# Altium footprint library FootPrintLib_3.PcbLib: 198 footprints (part 8 of 13)
Each footprint in its own frame and in the unit in brackets; x right, y up, seen from the top. Pads: shape width x height; smd on the part's side, far side on the other; paste and mask are expansions set on the pad; w line width, h text height; cw(c..) or ccw(c..) is an arc to the next point about the centre after c.
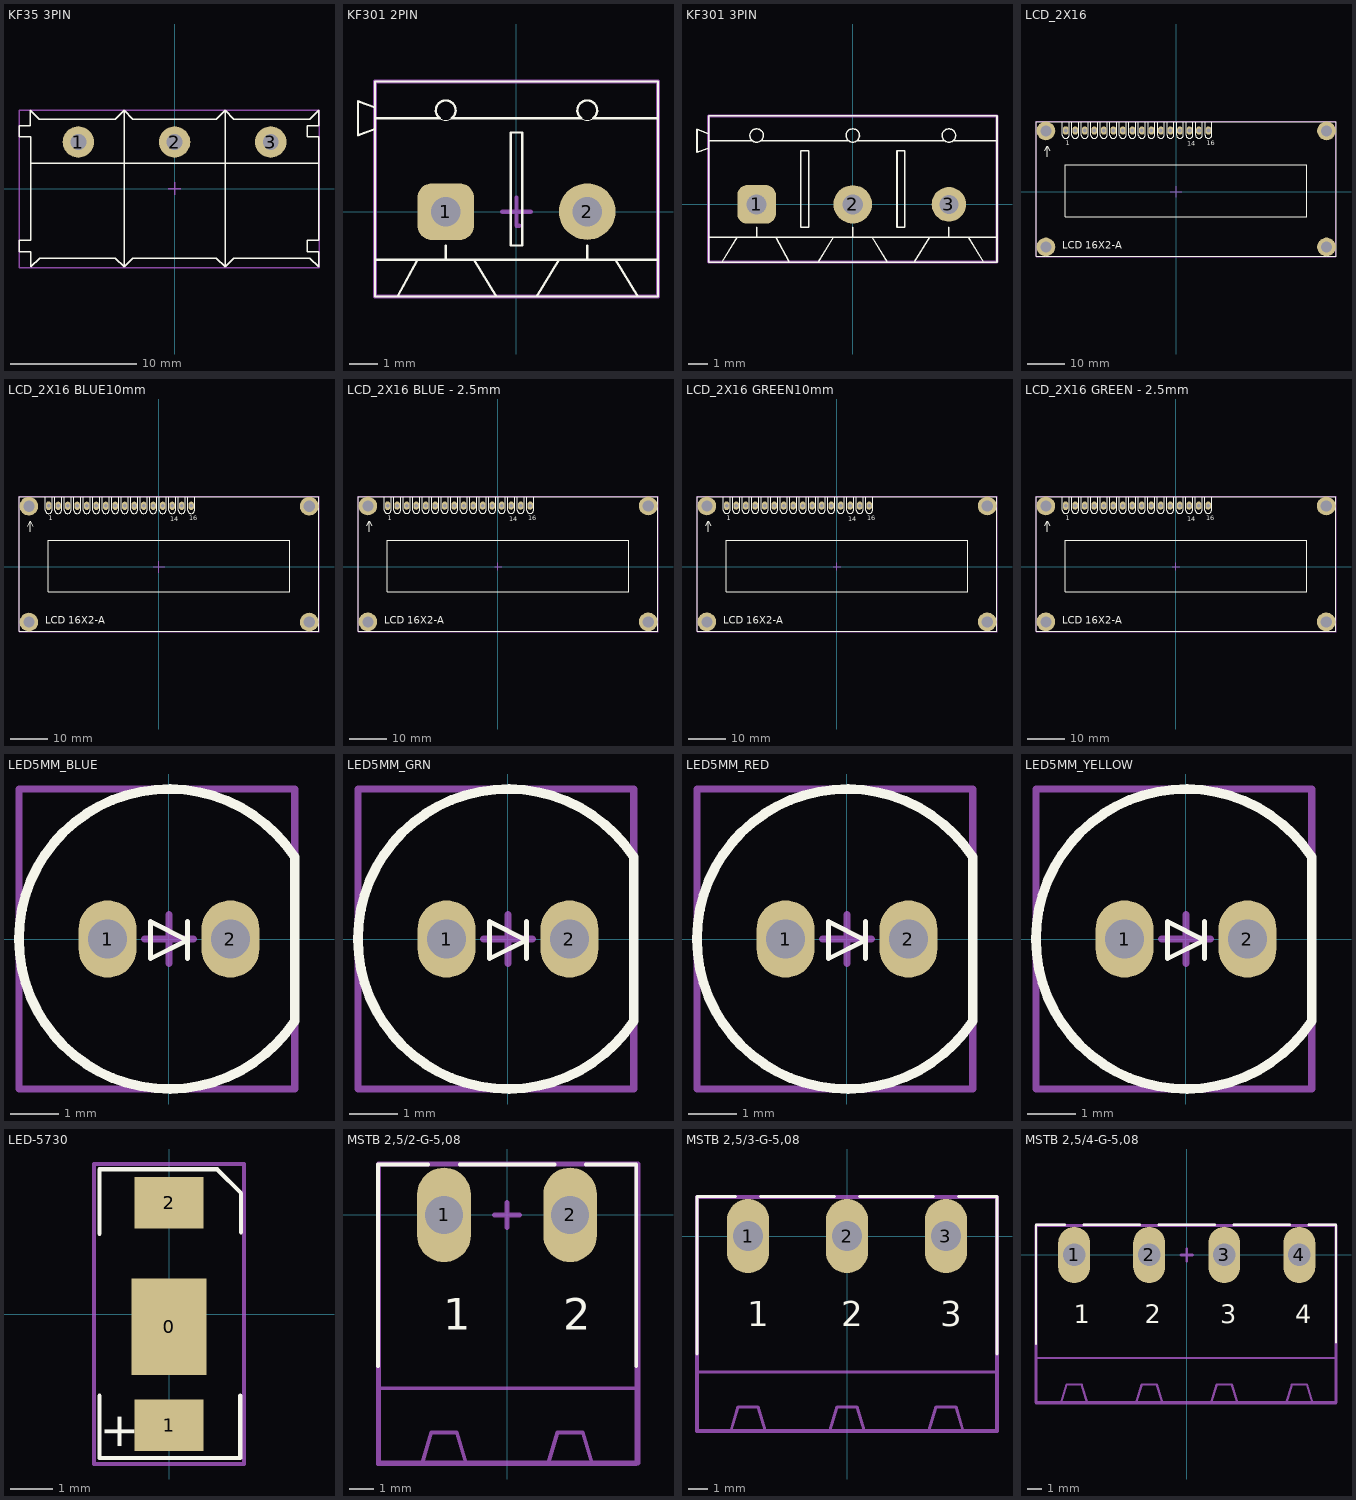
[diagram p7: the footprints below, top view; thin cyan lines are the x and y axes]

## KF35 3PIN [mm] "Designer Abbas Basereh"
height 12.5
pads (3):
  round 2.5 hole 1.25: 1(-7.62,3.7) 2(0,3.7) 3(7.62,3.7)
Top Overlay:
  lines w0.1: -11.4,2 11.4,2 ; -4,-6.2 -4,6.2 ; -4,-6.2 -3.3,-5.5 3.3,-5.5 4,-6.2 ; -4,-6.2 -4.7,-5.5 -10.7,-5.5 -11.4,-6.2 -11.4,-5 -12.3,-5 -12.3,-4.1 -11.4,-4.1 -11.4,4.1 -11.43,4.1 -12.33,4.1 -12.33,5 -11.43,5 -11.43,6.2 -10.73,5.5 -4.7,5.5 -4,6.2 ; -4,6.2 -3.3,5.5 3.3,5.5 4,6.2 ; 4,-6.2 4,6.2 ; 4,-6.2 4.7,-5.5 10.73,-5.5 11.43,-6.2 11.43,-5 10.53,-5 10.53,-4.1 11.43,-4.1 11.43,4.1 10.53,4.1 10.53,5 11.43,5 11.43,6.2 10.73,5.5 4.7,5.5 4,6.2
Mechanical 15:
  lines w0.1: -0.5,0 0.5,0 ; 0,-0.5 0,0.5 ; -12.3,-6.275 -12.3,6.225 11.45,6.225 11.45,-6.275 -12.3,-6.275

## KF301 2PIN [mm] "Designer Abbas Basereh"
height 7.5
pads (2):
  rrect50% 2x2 hole 1.05: 1(-2.5,0)
  round 2 hole 1.05: 2(2.5,0)
Top Overlay:
  lines w0.013: -2.71,3.3 ccw(c-2.5,3.58) -2.29,3.3 ; 2.29,3.3 ccw(c2.5,3.58) 2.71,3.3
  lines w0.08: -4.2,-3 -3.5,-1.7 -1.5,-1.7 -0.7,-3 ; -2.5,-1.7 -2.5,-1.2 ; 0.7,-3 1.5,-1.7 3.5,-1.7 4.3,-3 ; 2.5,-1.7 2.5,-1.2 ; -5.6,2.7 -5,2.918 ; -5.6,2.7 -5.6,3.9 ; -5.6,2.7 -5,2.918 ; -5.6,2.7 -5.6,3.9 ; -5.6,3.9 -5,3.682 ; -5.6,3.9 -5,3.682 ; -5,-3 -5,-1.7 ; -5,-3 5,-3 ; -5,-3 5,-3 ; -5,-3 -5,2.918 ; -5,-1.7 -5,3.3 ; -5,-1.7 5,-1.7 ; -5,3.3 -5,4.6 ; -5,3.3 -2.71,3.3 cw(c-2.5,3.58) -2.29,3.3 2.29,3.3 cw(c2.5,3.58) 2.71,3.3 5,3.3 ; -5,3.682 -5,4.6 ; -5,4.6 5,4.6 ; -5,4.6 5,4.6 ; 5,-3 5,-1.7 ; 5,-3 5,4.6 ; 5,-1.7 5,3.3 ; 5,3.3 5,4.6 ; -0.2,-1.2 -0.2,2.8 0.2,2.8 0.2,-1.2 -0.2,-1.2
Mechanical 15:
  lines w0.15: -0.5,0 0.5,0 ; 0,0.5 0,-0.5 0.1,-0.5 ; -5,-3 5,-3 5,4.6 -5,4.6 -5,-3
3D body "User Library-Terminal-Screw-3A-2way.STEP": height 10, standoff -3, extent -5.6,-3 5,4.6

## KF301 3PIN [mm] "Designer Abbas Basereh"
height 7.5
pads (3):
  rrect50% 2x2 hole 1.05: 1(-5,0)
  round 2 hole 1.05: 2(0,0)
  round 1.8 hole 1: 3(5,0)
Top Overlay:
  lines w0.08: -6.8,-3 -6,-1.7 -4,-1.7 -3.3,-3 ; -5,-1.7 -5,-1.2 ; -1.8,-3 -1,-1.7 1,-1.7 1.8,-3 ; 0,-1.7 0,-1.2 ; 3.2,-3 4,-1.7 6,-1.7 6.8,-3 ; 5,-1.7 5,-1.2 ; -8.1,2.7 -7.5,2.918 ; -8.1,2.7 -8.1,3.9 ; -8.1,2.7 -8.1,3.9 ; -8.1,2.7 -7.5,2.918 ; -8.1,3.9 -7.5,3.681 ; -8.1,3.9 -7.5,3.681 ; -7.5,-3 7.5,-3 ; -7.5,-3 -7.5,2.918 ; -7.5,-3 7.5,-3 ; -7.5,-3 -7.5,-1.7 ; -7.5,-1.7 7.5,-1.7 ; -7.5,-1.7 -7.5,3.3 ; -7.5,3.3 -5.21,3.3 ; -7.5,3.3 -7.5,4.6 ; -7.5,3.681 -7.5,4.6 ; -7.5,4.6 7.5,4.6 ; -7.5,4.6 7.5,4.6 ; -5.21,3.3 cw(c-5,3.58) -4.79,3.3 ; -5.21,3.3 ccw(c-5,3.58) -4.79,3.3 ; -4.79,3.3 -0.21,3.3 ; -0.21,3.3 cw(c0,3.58) 0.21,3.3 ; -0.21,3.3 ccw(c0,3.58) 0.21,3.3 ; 0.21,3.3 4.79,3.3 ; 4.79,3.3 cw(c5,3.58) 5.21,3.3 ; 4.79,3.3 ccw(c5,3.58) 5.21,3.3 ; 5.21,3.3 7.5,3.3 ; 7.5,-3 7.5,4.6 ; 7.5,-3 7.5,-1.7 ; 7.5,-1.7 7.5,3.3 ; 7.5,3.3 7.5,4.6 ; -2.7,-1.2 -2.7,2.8 -2.3,2.8 -2.3,-1.2 -2.7,-1.2 ; 2.3,-1.2 2.7,-1.2 2.7,2.8 2.3,2.8 2.3,-1.2
Mechanical 15:
  lines w0.15: -7.5,-3 -7.5,4.6 7.5,4.6 7.5,-3 -7.5,-3
3D body "User Library-Terminal-Screw-3A-3way.STEP": height 10, standoff -3, extent -8.1,-3 7.5,4.6

## LCD_2X16 [mm] "LCD 2x16 Alphanumberic-Designer Abbas Basereh"
height 50
pads (20):
  oct 1.5x2.2 hole 1: 1(-29.464,16.3)
  oval 1.5x2.2 hole 1: 2(-26.924,16.3) 3(-24.384,16.3) 4(-21.844,16.3) 5(-19.304,16.3) 6(-16.764,16.3) 7(-14.224,16.3) 8(-11.684,16.3) 9(-9.144,16.3) 10(-6.604,16.3) 11(-4.064,16.3) 12(-1.524,16.3) 13(1.016,16.3) 14(3.556,16.3) 15(6.096,16.3) 16(8.636,16.3)
  round 5 hole 3: ""(-34.756,-14.775) ""(-34.756,16.213) ""(40.174,-14.775) ""(40.174,16.213)
Top Overlay:
  circle w0.2: c-34.796,-14.788 r1.25
  circle w0.2: c40.204,-14.788 r1.25
  circle w0.2: c-34.796,16.213 r1.25
  circle w0.2: c40.204,16.213 r1.25
  lines w0.2: -35.01,10.879 -34.375,12.149 -33.74,10.879 ; -34.375,9.337 -34.375,12.022 ; -30.353,18.669 -30.353,15.113 ccw(c-29.464,15.113) -28.575,15.113 -28.575,18.669 ; -27.813,18.669 -27.813,15.113 ccw(c-26.924,15.113) -26.035,15.113 -26.035,18.669 ; -25.273,18.669 -25.273,15.113 ccw(c-24.384,15.113) -23.495,15.113 -23.495,18.669 ; -22.733,18.669 -22.733,15.113 ccw(c-21.844,15.113) -20.955,15.113 -20.955,18.669 ; -20.193,18.669 -20.193,15.113 ccw(c-19.304,15.113) -18.415,15.113 -18.415,18.669 ; -17.653,18.669 -17.653,15.113 ccw(c-16.764,15.113) -15.875,15.113 -15.875,18.669 ; -15.113,18.669 -15.113,15.113 ccw(c-14.224,15.113) -13.335,15.113 -13.335,18.669 ; -12.573,18.669 -12.573,15.113 ccw(c-11.684,15.113) -10.795,15.113 -10.795,18.669 ; -10.033,18.669 -10.033,15.113 ccw(c-9.144,15.113) -8.255,15.113 -8.255,18.669 ; -7.493,18.669 -7.493,15.113 ccw(c-6.604,15.113) -5.715,15.113 -5.715,18.669 ; -4.953,18.669 -4.953,15.113 ccw(c-4.064,15.113) -3.175,15.113 -3.175,18.669 ; -2.413,18.669 -2.413,15.113 ccw(c-1.524,15.113) -0.635,15.113 -0.635,18.669 ; 0.127,18.669 0.127,15.113 ccw(c1.016,15.113) 1.905,15.113 1.905,18.669 ; 2.667,18.669 2.667,15.113 ccw(c3.556,15.113) 4.445,15.113 4.445,18.669 ; 5.207,18.669 5.207,15.113 ccw(c6.096,15.113) 6.985,15.113 6.985,18.669 ; 7.747,18.669 7.747,15.113 ccw(c8.636,15.113) 9.525,15.113 9.525,18.669 ; -37.296,-17.288 42.704,-17.288 42.704,18.712 -37.296,18.712 -37.296,-17.288 ; -29.546,-6.688 -29.546,7.112 34.954,7.112 34.954,-6.688 -29.546,-6.688
  text "14" at 3.048,12.192 h1.27
  text "1" at -29.464,12.446 h1.27
  text "16" at 8.128,12.446 h1.27
  text "LCD 16X2-A" at -30.438,-15.283 h1.91
Mechanical 15:
  lines w0.15: -1.5,0 1.5,0 ; 0,-1.5 0,1.5 ; -37.4,-17.4 42.7,-17.4 42.7,18.8 -37.4,18.8 -37.4,-17.4
3D body "User Library-AC162B.STEP": height 21, standoff 7.1, extent -37.35,-17.3 42.65,18.7
3D body: height 10, standoff 0, extent -37.338,13.589 -32.131,18.796
3D body: height 10, standoff 0, extent -37.338,-17.399 -32.131,-12.192
3D body: height 10, standoff 0, extent 37.592,-17.399 42.799,-12.192
3D body: height 10, standoff 0, extent 37.592,13.589 42.799,18.796

## LCD_2X16 BLUE10mm [mm] "LCD 2x16 Alphanumberic-Designer Abbas Basereh"
height 50
pads (20):
  oct 1.5x2.2 hole 1: 1(-29.464,16.3)
  oval 1.5x2.2 hole 1: 2(-26.924,16.3) 3(-24.384,16.3) 4(-21.844,16.3) 5(-19.304,16.3) 6(-16.764,16.3) 7(-14.224,16.3) 8(-11.684,16.3) 9(-9.144,16.3) 10(-6.604,16.3) 11(-4.064,16.3) 12(-1.524,16.3) 13(1.016,16.3) 14(3.556,16.3) 15(6.096,16.3) 16(8.636,16.3)
  round 5 hole 3: ""(-34.756,-14.775) ""(-34.756,16.213) ""(40.174,-14.775) ""(40.174,16.213)
Top Overlay:
  circle w0.2: c40.204,16.213 r1.25
  circle w0.2: c-34.796,16.213 r1.25
  circle w0.2: c40.204,-14.788 r1.25
  circle w0.2: c-34.796,-14.788 r1.25
  lines w0.2: -35.01,10.879 -34.375,12.149 -33.74,10.879 ; -34.375,9.337 -34.375,12.022 ; -30.353,18.669 -30.353,15.113 ccw(c-29.464,15.113) -28.575,15.113 -28.575,18.669 ; -27.813,18.669 -27.813,15.113 ccw(c-26.924,15.113) -26.035,15.113 -26.035,18.669 ; -25.273,18.669 -25.273,15.113 ccw(c-24.384,15.113) -23.495,15.113 -23.495,18.669 ; -22.733,18.669 -22.733,15.113 ccw(c-21.844,15.113) -20.955,15.113 -20.955,18.669 ; -20.193,18.669 -20.193,15.113 ccw(c-19.304,15.113) -18.415,15.113 -18.415,18.669 ; -17.653,18.669 -17.653,15.113 ccw(c-16.764,15.113) -15.875,15.113 -15.875,18.669 ; -15.113,18.669 -15.113,15.113 ccw(c-14.224,15.113) -13.335,15.113 -13.335,18.669 ; -12.573,18.669 -12.573,15.113 ccw(c-11.684,15.113) -10.795,15.113 -10.795,18.669 ; -10.033,18.669 -10.033,15.113 ccw(c-9.144,15.113) -8.255,15.113 -8.255,18.669 ; -7.493,18.669 -7.493,15.113 ccw(c-6.604,15.113) -5.715,15.113 -5.715,18.669 ; -4.953,18.669 -4.953,15.113 ccw(c-4.064,15.113) -3.175,15.113 -3.175,18.669 ; -2.413,18.669 -2.413,15.113 ccw(c-1.524,15.113) -0.635,15.113 -0.635,18.669 ; 0.127,18.669 0.127,15.113 ccw(c1.016,15.113) 1.905,15.113 1.905,18.669 ; 2.667,18.669 2.667,15.113 ccw(c3.556,15.113) 4.445,15.113 4.445,18.669 ; 5.207,18.669 5.207,15.113 ccw(c6.096,15.113) 6.985,15.113 6.985,18.669 ; 7.747,18.669 7.747,15.113 ccw(c8.636,15.113) 9.525,15.113 9.525,18.669 ; -37.296,-17.288 -37.296,18.712 42.704,18.712 42.704,-17.288 -37.296,-17.288 ; -29.546,-6.688 34.954,-6.688 34.954,7.112 -29.546,7.112 -29.546,-6.688
  text "LCD 16X2-A" at -30.438,-15.283 h1.91
  text "16" at 8.128,12.446 h1.27
  text "1" at -29.464,12.446 h1.27
  text "14" at 3.048,12.192 h1.27
Mechanical 15:
  lines w0.15: -1.5,0 1.5,0 ; -0.1,-1.6 -0.1,1.5 ; -37.4,-17.4 42.8,-17.4 42.8,18.9 -37.4,18.9 -37.4,-17.4
3D body: height 10, standoff 0, extent 37.592,13.589 42.799,18.796
3D body: height 10, standoff 0, extent 37.592,-17.399 42.799,-12.192
3D body: height 10, standoff 0, extent -37.338,-17.399 -32.131,-12.192
3D body: height 10, standoff 0, extent -37.338,13.589 -32.131,18.796
3D body "User Library-LCD-5.STEP": height 19.8, standoff 1.5, extent -37.35,-17.3 42.65,18.7
3D body: height 10, standoff 0, extent -30.25,15.25 9.75,17.75

## LCD_2X16 BLUE - 2.5mm [mm] "LCD 2x16 Alphanumberic-Designer Abbas Basereh"
height 40
pads (20):
  oct 1.5x2.2 hole 1: 1(-29.464,16.3)
  oval 1.5x2.2 hole 1: 2(-26.924,16.3) 3(-24.384,16.3) 4(-21.844,16.3) 5(-19.304,16.3) 6(-16.764,16.3) 7(-14.224,16.3) 8(-11.684,16.3) 9(-9.144,16.3) 10(-6.604,16.3) 11(-4.064,16.3) 12(-1.524,16.3) 13(1.016,16.3) 14(3.556,16.3) 15(6.096,16.3) 16(8.636,16.3)
  round 5 hole 3: ""(-34.756,-14.775) ""(-34.756,16.213) ""(40.174,-14.775) ""(40.174,16.213)
Top Overlay:
  circle w0.2: c40.204,16.213 r1.25
  circle w0.2: c-34.796,16.213 r1.25
  circle w0.2: c40.204,-14.788 r1.25
  circle w0.2: c-34.796,-14.788 r1.25
  lines w0.2: -35.01,10.879 -34.375,12.149 -33.74,10.879 ; -34.375,9.337 -34.375,12.022 ; -30.353,18.669 -30.353,15.113 ccw(c-29.464,15.113) -28.575,15.113 -28.575,18.669 ; -27.813,18.669 -27.813,15.113 ccw(c-26.924,15.113) -26.035,15.113 -26.035,18.669 ; -25.273,18.669 -25.273,15.113 ccw(c-24.384,15.113) -23.495,15.113 -23.495,18.669 ; -22.733,18.669 -22.733,15.113 ccw(c-21.844,15.113) -20.955,15.113 -20.955,18.669 ; -20.193,18.669 -20.193,15.113 ccw(c-19.304,15.113) -18.415,15.113 -18.415,18.669 ; -17.653,18.669 -17.653,15.113 ccw(c-16.764,15.113) -15.875,15.113 -15.875,18.669 ; -15.113,18.669 -15.113,15.113 ccw(c-14.224,15.113) -13.335,15.113 -13.335,18.669 ; -12.573,18.669 -12.573,15.113 ccw(c-11.684,15.113) -10.795,15.113 -10.795,18.669 ; -10.033,18.669 -10.033,15.113 ccw(c-9.144,15.113) -8.255,15.113 -8.255,18.669 ; -7.493,18.669 -7.493,15.113 ccw(c-6.604,15.113) -5.715,15.113 -5.715,18.669 ; -4.953,18.669 -4.953,15.113 ccw(c-4.064,15.113) -3.175,15.113 -3.175,18.669 ; -2.413,18.669 -2.413,15.113 ccw(c-1.524,15.113) -0.635,15.113 -0.635,18.669 ; 0.127,18.669 0.127,15.113 ccw(c1.016,15.113) 1.905,15.113 1.905,18.669 ; 2.667,18.669 2.667,15.113 ccw(c3.556,15.113) 4.445,15.113 4.445,18.669 ; 5.207,18.669 5.207,15.113 ccw(c6.096,15.113) 6.985,15.113 6.985,18.669 ; 7.747,18.669 7.747,15.113 ccw(c8.636,15.113) 9.525,15.113 9.525,18.669 ; -37.296,-17.288 -37.296,18.712 42.704,18.712 42.704,-17.288 -37.296,-17.288 ; -29.546,-6.688 34.954,-6.688 34.954,7.112 -29.546,7.112 -29.546,-6.688
  text "LCD 16X2-A" at -30.438,-15.283 h1.91
  text "16" at 8.128,12.446 h1.27
  text "1" at -29.464,12.446 h1.27
  text "14" at 3.048,12.192 h1.27
Mechanical 15:
  lines w0.15: -0.9,0 1,0 ; 0,-1 0,1 ; -37.4,-17.4 -37.4,18.8 42.8,18.8 42.8,-17.4 -37.4,-17.4
3D body "User Library-LCD-5.STEP": height 12.3, standoff -6, extent -37.35,-17.3 42.65,18.7

## LCD_2X16 GREEN10mm [mm] "LCD 2x16 Alphanumberic-Designer Abbas Basereh"
height 50
pads (20):
  oct 1.5x2.2 hole 1: 1(-29.464,16.3)
  oval 1.5x2.2 hole 1: 2(-26.924,16.3) 3(-24.384,16.3) 4(-21.844,16.3) 5(-19.304,16.3) 6(-16.764,16.3) 7(-14.224,16.3) 8(-11.684,16.3) 9(-9.144,16.3) 10(-6.604,16.3) 11(-4.064,16.3) 12(-1.524,16.3) 13(1.016,16.3) 14(3.556,16.3) 15(6.096,16.3) 16(8.636,16.3)
  round 5 hole 3: ""(-34.756,-14.775) ""(-34.756,16.213) ""(40.174,-14.775) ""(40.174,16.213)
Top Overlay:
  circle w0.2: c-34.796,-14.788 r1.25
  circle w0.2: c40.204,-14.788 r1.25
  circle w0.2: c-34.796,16.213 r1.25
  circle w0.2: c40.204,16.213 r1.25
  lines w0.2: -35.01,10.879 -34.375,12.149 -33.74,10.879 ; -34.375,9.337 -34.375,12.022 ; -30.353,18.669 -30.353,15.113 ccw(c-29.464,15.113) -28.575,15.113 -28.575,18.669 ; -27.813,18.669 -27.813,15.113 ccw(c-26.924,15.113) -26.035,15.113 -26.035,18.669 ; -25.273,18.669 -25.273,15.113 ccw(c-24.384,15.113) -23.495,15.113 -23.495,18.669 ; -22.733,18.669 -22.733,15.113 ccw(c-21.844,15.113) -20.955,15.113 -20.955,18.669 ; -20.193,18.669 -20.193,15.113 ccw(c-19.304,15.113) -18.415,15.113 -18.415,18.669 ; -17.653,18.669 -17.653,15.113 ccw(c-16.764,15.113) -15.875,15.113 -15.875,18.669 ; -15.113,18.669 -15.113,15.113 ccw(c-14.224,15.113) -13.335,15.113 -13.335,18.669 ; -12.573,18.669 -12.573,15.113 ccw(c-11.684,15.113) -10.795,15.113 -10.795,18.669 ; -10.033,18.669 -10.033,15.113 ccw(c-9.144,15.113) -8.255,15.113 -8.255,18.669 ; -7.493,18.669 -7.493,15.113 ccw(c-6.604,15.113) -5.715,15.113 -5.715,18.669 ; -4.953,18.669 -4.953,15.113 ccw(c-4.064,15.113) -3.175,15.113 -3.175,18.669 ; -2.413,18.669 -2.413,15.113 ccw(c-1.524,15.113) -0.635,15.113 -0.635,18.669 ; 0.127,18.669 0.127,15.113 ccw(c1.016,15.113) 1.905,15.113 1.905,18.669 ; 2.667,18.669 2.667,15.113 ccw(c3.556,15.113) 4.445,15.113 4.445,18.669 ; 5.207,18.669 5.207,15.113 ccw(c6.096,15.113) 6.985,15.113 6.985,18.669 ; 7.747,18.669 7.747,15.113 ccw(c8.636,15.113) 9.525,15.113 9.525,18.669 ; -37.296,-17.288 42.704,-17.288 42.704,18.712 -37.296,18.712 -37.296,-17.288 ; -29.546,-6.688 -29.546,7.112 34.954,7.112 34.954,-6.688 -29.546,-6.688
  text "14" at 3.048,12.192 h1.27
  text "1" at -29.464,12.446 h1.27
  text "16" at 8.128,12.446 h1.27
  text "LCD 16X2-A" at -30.438,-15.283 h1.91
Mechanical 15:
  lines w0.15: -1,0 1,0 ; 0,-1 0,1 ; -37.4,-17.4 -37.4,18.8 42.8,18.8 42.8,-17.4 -37.3,-17.4 -37.4,-17.4
3D body: height 10, standoff 0, extent -30.25,15.25 9.75,17.75
3D body "User Library-LCD 16x2 JHD162A.STEP": height 20.6, standoff 7.45, extent -37.35,-17.3 42.65,18.7
3D body: height 10, standoff 0, extent -37.338,13.589 -32.131,18.796
3D body: height 10, standoff 0, extent -37.338,-17.399 -32.131,-12.192
3D body: height 10, standoff 0, extent 37.592,-17.399 42.799,-12.192
3D body: height 10, standoff 0, extent 37.592,13.589 42.799,18.796

## LCD_2X16 GREEN - 2.5mm [mm] "LCD 2x16 Alphanumberic-Designer Abbas Basereh"
height 40
pads (20):
  oct 1.5x2.2 hole 1: 1(-29.464,16.3)
  oval 1.5x2.2 hole 1: 2(-26.924,16.3) 3(-24.384,16.3) 4(-21.844,16.3) 5(-19.304,16.3) 6(-16.764,16.3) 7(-14.224,16.3) 8(-11.684,16.3) 9(-9.144,16.3) 10(-6.604,16.3) 11(-4.064,16.3) 12(-1.524,16.3) 13(1.016,16.3) 14(3.556,16.3) 15(6.096,16.3) 16(8.636,16.3)
  round 5 hole 3: ""(-34.756,-14.775) ""(-34.756,16.213) ""(40.174,-14.775) ""(40.174,16.213)
Top Overlay:
  circle w0.2: c-34.796,-14.788 r1.25
  circle w0.2: c40.204,-14.788 r1.25
  circle w0.2: c-34.796,16.213 r1.25
  circle w0.2: c40.204,16.213 r1.25
  lines w0.2: -35.01,10.879 -34.375,12.149 -33.74,10.879 ; -34.375,9.337 -34.375,12.022 ; -30.353,18.669 -30.353,15.113 ccw(c-29.464,15.113) -28.575,15.113 -28.575,18.669 ; -27.813,18.669 -27.813,15.113 ccw(c-26.924,15.113) -26.035,15.113 -26.035,18.669 ; -25.273,18.669 -25.273,15.113 ccw(c-24.384,15.113) -23.495,15.113 -23.495,18.669 ; -22.733,18.669 -22.733,15.113 ccw(c-21.844,15.113) -20.955,15.113 -20.955,18.669 ; -20.193,18.669 -20.193,15.113 ccw(c-19.304,15.113) -18.415,15.113 -18.415,18.669 ; -17.653,18.669 -17.653,15.113 ccw(c-16.764,15.113) -15.875,15.113 -15.875,18.669 ; -15.113,18.669 -15.113,15.113 ccw(c-14.224,15.113) -13.335,15.113 -13.335,18.669 ; -12.573,18.669 -12.573,15.113 ccw(c-11.684,15.113) -10.795,15.113 -10.795,18.669 ; -10.033,18.669 -10.033,15.113 ccw(c-9.144,15.113) -8.255,15.113 -8.255,18.669 ; -7.493,18.669 -7.493,15.113 ccw(c-6.604,15.113) -5.715,15.113 -5.715,18.669 ; -4.953,18.669 -4.953,15.113 ccw(c-4.064,15.113) -3.175,15.113 -3.175,18.669 ; -2.413,18.669 -2.413,15.113 ccw(c-1.524,15.113) -0.635,15.113 -0.635,18.669 ; 0.127,18.669 0.127,15.113 ccw(c1.016,15.113) 1.905,15.113 1.905,18.669 ; 2.667,18.669 2.667,15.113 ccw(c3.556,15.113) 4.445,15.113 4.445,18.669 ; 5.207,18.669 5.207,15.113 ccw(c6.096,15.113) 6.985,15.113 6.985,18.669 ; 7.747,18.669 7.747,15.113 ccw(c8.636,15.113) 9.525,15.113 9.525,18.669 ; -37.296,-17.288 42.704,-17.288 42.704,18.712 -37.296,18.712 -37.296,-17.288 ; -29.546,-6.688 -29.546,7.112 34.954,7.112 34.954,-6.688 -29.546,-6.688
  text "14" at 3.048,12.192 h1.27
  text "1" at -29.464,12.446 h1.27
  text "16" at 8.128,12.446 h1.27
  text "LCD 16X2-A" at -30.438,-15.283 h1.91
Mechanical 15:
  lines w0.15: -1,0 1,0 ; 0,-1 0,1 ; -37.4,-17.4 -37.4,18.8 42.8,18.8 42.8,-17.4 -37.4,-17.4
3D body "User Library-LCD 16x2 JHD162A.STEP": height 13.1, standoff -0.05, extent -37.35,-17.3 42.65,18.7

## LED5MM_BLUE [mm] "LED 5MM THROUGH HOLE BLUE-Designer Abbas Basereh"
height 7.62
pads (2):
  oval 1.2x1.6 hole 0.8: 1(-1.27,0) 2(1.27,0)
Top Overlay:
  lines w0.1: 0.381,-0.403 0.381,0.359 ; -0.381,-0.403 0.381,-0.022 -0.381,0.359 -0.381,-0.403
  lines w0.2: 2.6,-1.7 2.6,1.7 ; 2.6,-1.688 cw(c0,0) 2.6,1.688
Mechanical 15:
  lines w0.15: -0.5,0 0.5,0 ; 0,-0.5 0,0.5 ; -3.1,-3.1 2.6,-3.1 2.6,3.1 -3.1,3.1 -3.1,-3.1
3D body "LED-D5G.step": height 9.14, standoff -6.3, extent -3,-3 2.5,3

## LED5MM_GRN [mm] "LED 5MM THROUGH HOLE GREEN-Designer Abbas Basereh"
height 7.62
pads (2):
  oval 1.2x1.6 hole 0.8: 1(-1.27,0) 2(1.27,0)
Top Overlay:
  lines w0.1: 0.381,-0.403 0.381,0.359 ; -0.381,-0.403 0.381,-0.022 -0.381,0.359 -0.381,-0.403
  lines w0.2: 2.6,-1.7 2.6,1.7 ; 2.6,-1.688 cw(c0,0) 2.6,1.688
Mechanical 15:
  lines w0.15: -0.5,0 0.5,0 ; 0,-0.5 0,0.5 ; -3.1,-3.1 2.6,-3.1 2.6,3.1 -3.1,3.1 -3.1,-3.1
3D body "LED-D5G.step": height 9.14, standoff -6.3, extent -3,-3 2.5,3

## LED5MM_RED [mm] "LED 5MM THROUGH HOLE RED-Designer Abbas Basereh"
height 7.62
pads (2):
  oval 1.2x1.6 hole 0.8: 1(-1.27,0) 2(1.27,0)
Top Overlay:
  lines w0.1: 0.381,-0.403 0.381,0.359 ; -0.381,-0.403 0.381,-0.022 -0.381,0.359 -0.381,-0.403
  lines w0.2: 2.6,-1.7 2.6,1.7 ; 2.6,-1.688 cw(c0,0) 2.6,1.688
Mechanical 15:
  lines w0.15: -0.5,0 0.5,0 ; 0,-0.5 0,0.5 ; -3.1,-3.1 2.6,-3.1 2.6,3.1 -3.1,3.1 -3.1,-3.1
3D body "LED-D5G.step": height 9.14, standoff -6.3, extent -3,-3 2.5,3

## LED5MM_YELLOW [mm] "LED 5MM THROUGH HOLE YELLOW-Designer Abbas Basereh"
height 7.62
pads (2):
  oval 1.2x1.6 hole 0.8: 1(-1.27,0) 2(1.27,0)
Top Overlay:
  lines w0.1: 0.381,-0.403 0.381,0.359 ; -0.381,-0.403 -0.381,0.359 0.381,-0.022 -0.381,-0.403
  lines w0.2: 2.6,-1.7 2.6,1.7 ; 2.6,-1.688 cw(c0,0) 2.6,1.688
Mechanical 15:
  lines w0.15: -0.5,0 0.5,0 ; 0,-0.5 0,0.5 ; -3.1,-3.1 2.6,-3.1 2.6,3.1 -3.1,3.1 -3.1,-3.1
3D body "LED-D5G.step": height 9.14, standoff -6.3, extent -3,-3 2.5,3

## LED-5730 [mm] "LED; 2 Leads"
pads (3):
  rect 1.75x2.25 smd: 0(0,-0.3)
  rect 1.6x1.2 smd: 1(0,-2.6) 2(0,2.6)
Top Overlay:
  lines w0.1: -1.62,-1.905 -1.62,-3.36 1.665,-3.36 1.665,-1.905 ; -1.62,1.875 -1.62,3.375 1.125,3.375 1.68,2.82 1.68,2.61 1.68,1.905
  text "+" at -0.8,-3.2 h0.8
Mechanical 15:
  lines w0.1: -0.25,0 0.25,0 ; 0,-0.25 0,0.25 ; -1.75,-3.5 1.75,-3.5 1.75,3.5 -1.75,3.5 -1.75,-3.5
3D body "User Library-LED-midPower.STEP": height 0.76, standoff 0, extent -1.5,-2.8 1.5,2.8

## MSTB 2,5/2-G-5,08 [mil] "Header, Nominal current: 12 A Rated voltage (III/2): 320 V Number of positions: 2 Pitch: 5.08 mm Color: green Contact surface: Tin Assembly: Soldering DESIGNER:ABBAS BASEREH"
height 338.58
pads (2):
  oval 85x150 hole 60: 1(-100,0) 2(100,0)
Top Overlay:
  lines w6: -204.72,-239.72 -204.72,80 -125,80 ; -75,80 75,80 ; 125,80 204.72,80 204.72,-239.72
  text "2" at 88.74,-182.48 h50
  text "1" at -101.26,-182.48 h50
Mechanical 13:
  lines w6: -204.72,-275 204.72,-275 ; -125,80 -204.72,80 -204.72,-239.72 -204.72,-395 -135,-395 ; -75,80 75,80 ; 125,80 204.72,80 204.72,-239.72 204.72,-395 135,-395 ; -135,-395 -65,-395 ; -135,-395 -120,-345 -80,-345 -65,-395 ; -65,-395 65,-395 ; 65,-395 135,-395 ; 65,-395 80,-345 120,-345 135,-395
Mechanical 15:
  lines w7.87: -19.68,0 19.68,0 ; 0,-19.68 0,19.68 ; -203.74,-393.7 -203.74,80.71 207.68,80.71 207.68,-393.7 -203.74,-393.7
3D body "User Library-MSTB 2,5-2-G-5,08 1770711.STEP": height 339.58, standoff -136.8, extent -199.21,-393.75 200.79,78.79

## MSTB 2,5/3-G-5,08 [mil] "Header, Nominal current: 12 A Rated voltage (III/2): 320 V Number of positions: 3 Pitch: 5.08 mm Color: green Contact surface: Tin Assembly: Soldering  DESIGNER:ABBAS BASEREH"
height 338.58
pads (3):
  oval 85x150 hole 60: 1(-200,0) 2(0,0) 3(200,0)
Top Overlay:
  lines w6: -303.15,-238.15 -303.15,80 -225,80 ; -175,80 -25,80 ; 25,80 175,80 ; 225,80 303.15,80 303.15,-238.15
  text "1" at -201.26,-182.48 h50
  text "2" at -11.26,-182.48 h50
  text "3" at 188.74,-182.48 h50
Mechanical 13:
  lines w6: -303.15,-275 303.15,-275 ; -225,80 -303.15,80 -303.15,-238.15 -303.15,-395 -235,-395 ; -175,80 -25,80 ; 25,80 175,80 ; 225,80 303.15,80 303.15,-238.15 303.15,-395 235,-395 ; -235,-395 -220,-345 -180,-345 -165,-395 ; -235,-395 -165,-395 ; -165,-395 -35,-395 ; -35,-395 -20,-345 20,-345 35,-395 ; -35,-395 35,-395 ; 35,-395 165,-395 ; 165,-395 235,-395 ; 165,-395 180,-345 220,-345 235,-395
Mechanical 15:
  lines w7.87: -303.15,-393.7 -303.15,78.74 303.15,78.74 303.15,-393.7 -303.15,-393.7
3D body "User Library-MSTB 2,5-3-G-5,08 1759020.STEP": height 339.58, standoff -136.8, extent -300,-393.79 300,78.74

## MSTB 2,5/4-G-5,08 [mil] "Header, Nominal current: 12 A Rated voltage (III/2): 320 V Number of positions: 4 Pitch: 5,08 mm Color: green Contact surface: Tin Assembly: Soldering  DESIGNER ABBAS BASEREH"
height 338.58
pads (4):
  oval 85x150 hole 60: 1(-300,0) 2(-100,0) 3(100,0) 4(300,0)
Top Overlay:
  lines w6: -401.57,-236.57 -401.57,80 -325,80 ; -275,80 -125,80 ; -75,80 75,80 ; 125,80 275,80 ; 325,80 397.64,80 397.64,-232.64
  text "1" at -301.26,-182.48 h50
  text "2" at -111.26,-182.48 h50
  text "3" at 88.74,-182.48 h50
  text "4" at 288.74,-182.48 h50
Mechanical 13:
  lines w6: -397.64,-275 397.64,-275 ; -325,80 -401.57,80 -401.57,-236.57 -401.57,-395 -335,-395 ; -275,80 -125,80 ; -75,80 75,80 ; 125,80 275,80 ; 325,80 397.64,80 397.64,-232.64 397.64,-395 335,-395 ; -335,-395 -320,-345 -280,-345 -265,-395 ; -335,-395 -265,-395 ; -265,-395 -135,-395 ; -135,-395 -120,-345 -80,-345 -65,-395 ; -135,-395 -65,-395 ; -65,-395 65,-395 ; 65,-395 135,-395 ; 65,-395 80,-345 120,-345 135,-395 ; 135,-395 265,-395 ; 265,-395 335,-395 ; 265,-395 280,-345 320,-345 335,-395
Mechanical 15:
  lines w7.87: -15.75,0 15.75,0 ; 0,-15.75 0,15.75 ; -401.57,-393.7 -401.57,78.74 397.64,78.74 397.64,-393.7 -401.57,-393.7
3D body "User Library-MSTB 2,5-4-G-5,08 1759033.STEP": height 338.58, standoff -137.8, extent -400,-393.79 400,78.74